# Altium schematic symbol library 2Cnts-S.SchLib: 1 symbol
Pins are listed as number, name and electrical type; pins without a type are passive.

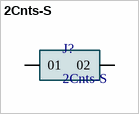
[diagram p0: symbol 2Cnts-S]

## 2Cnts-S
designator J?
MP: MTSW-101-09-G-D-235; Package: None; Price: None; Value: *; Availability: Unavailable
footprint 2Cnts-S
pins: 01, 02